# Altium schematic symbol library RC0402FR-0711K8L.SchLib: 1 symbol
Pins are listed as number, name and electrical type; pins without a type are passive.

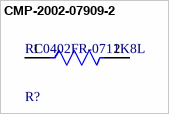
[diagram p0: symbol CMP-2002-07909-2]

## CMP-2002-07909-2
designator R?, comment RC0402FR-0711K8L
NexarPartId: 9293467; Resistance: 11.8kΩ; Voltage Rating (DC): 50V; Tolerance: 1%; Temperature Coefficient: 100ppm/°C; Max Power Dissipation: 63mW; Depth: 500µm; Features: Moisture Resistant; Case Code (Metric): 1005; Number of Terminations: 2; Width: 508µm; Length: 1mm; Case Code (Imperial): 0402; Max Operating Temperature: 155°C; Composition: Thick Film; Case/Package: 0402; Contact Plating: Lead, Tin; Weight: 652.039032µg; Voltage Rating: 50V; Military Standard: Not; Radiation Hardening: No; Termination: SMD/SMT; RoHS: Compliant; Height: 400µm; Lead Free: Lead Free; Packaging: Tape & Reel; Min Operating Temperature: -55°C; Schedule B: 8533210045, 8533210045|8533210045, 8533210045|8533210045|8533210045, 8533210045|8533210045|8533210045|8533210045; Power Rating: 63mW
footprint FP-RC0402-0_4-MFG
footprint FP-RC0402-0_4-IPC_B
footprint FP-RC0402-0_4-IPC_C
footprint FP-RC0402-0_4-IPC_A
pins: 1, 2